# Altium schematic symbol library 保险丝_Littelfuse 0451003.MRL.SCHLIB: 1 symbol
Pins are listed as number, name and electrical type; pins without a type are passive.

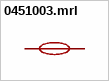
[diagram p0: symbol 0451003.mrl]

## 0451003.mrl
designator F??  (value not drawn)
类型:贴片式保险丝;额定电流:3A;额定电压:125V;分断能力:50A;; Manufacturer: Littelfuse(美国力特); AddInBom: yes; ModelId: ab98867368e34e88a7540bafa62641fb; ModelName: FUSE-SMD_L6.1-W2.7-H2.7; ModelTransform: 240.157,106.299,0,0,0,0,-0.0005,0.0005,0; Type: 贴片式保险丝; Current Rating: 3A; Voltage Rating (DC): 125V; Melting I2t: 0.459; Interrupt Rating: 50A; Symbol: 0451003.MRL; LCSC Part Name: 125V贴片式保险丝; SupplierPart: C13982; ManufacturerPart: 0451003.MRL; Supplier Footprint: 2410; JLCPCB Part Class: Extended Part; Datasheet: https://item.szlcsc.com/datasheet/0451003.MRL/14638.html; Supplier: LCSC; ConvertToPcb: yes; FootprintName: FUSE-SMD_L6.1-W2.7; Operating Temperature: -55℃~+125℃; Diameter (φD): -; Length: 6.1mm; Width: 2.5mm; Height: -; Pitch: -
footprint FUSE-SMD_L6.1-W2.7
pins: 1, 2